# Altium footprint library VL53L9CX.PcbLib: 1 footprints
Each footprint in its own frame and in the unit in brackets; x right, y up, seen from the top. Pads: shape width x height; smd on the part's side, far side on the other; paste and mask are expansions set on the pad; w line width, h text height; cw(c..) or ccw(c..) is an arc to the next point about the centre after c.
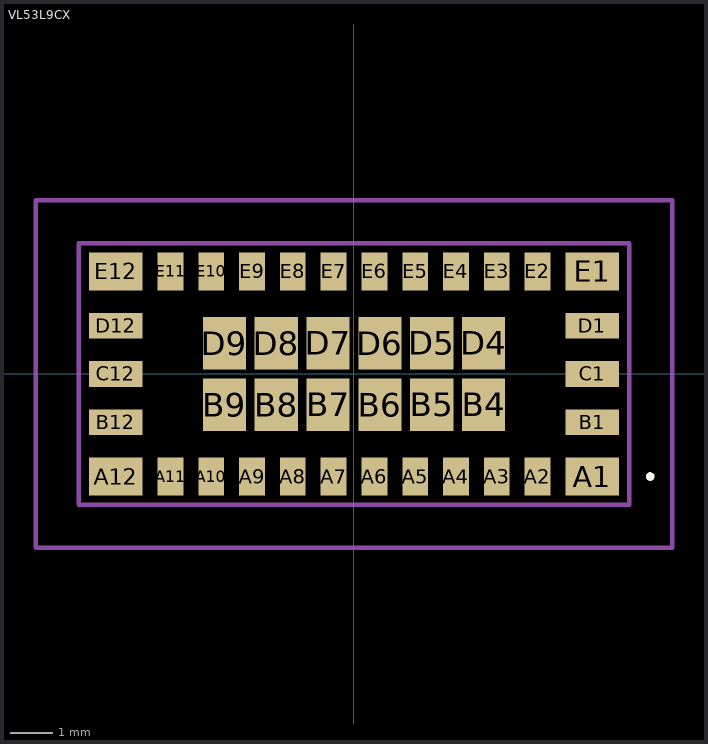
[diagram p0: the footprint, top view; thin cyan lines are the x and y axes]

## VL53L9CX [mm]
pads (42):
  rect 1.255x0.88 smd: A1(5.553,-2.39) A12(-5.553,-2.39) E1(5.553,2.39) E12(-5.553,2.39)
  rect 0.6x0.88 smd: A2(4.275,-2.39) A3(3.325,-2.39) A4(2.375,-2.39) A5(1.425,-2.39) A6(0.475,-2.39) A7(-0.475,-2.39) A8(-1.425,-2.39) A9(-2.375,-2.39) A10(-3.325,-2.39) A11(-4.275,-2.39) E2(4.275,2.39) E3(3.325,2.39) E4(2.375,2.39) E5(1.425,2.39) E6(0.475,2.39) E7(-0.475,2.39) E8(-1.425,2.39) E9(-2.375,2.39) E10(-3.325,2.39) E11(-4.275,2.39)
  rect 1.255x0.6 smd: B1(5.553,-1.125) B12(-5.553,-1.125) C1(5.553,0) C12(-5.553,0) D1(5.553,1.125) D12(-5.553,1.125)
  rect 1.008x1.225 smd: B4(3.02,-0.713) B5(1.812,-0.713) B6(0.604,-0.713) B7(-0.604,-0.713) B8(-1.812,-0.713) B9(-3.02,-0.713) D4(3.02,0.713) D5(1.812,0.713) D6(0.604,0.713) D7(-0.604,0.713) D8(-1.812,0.713) D9(-3.02,0.713)
Top Overlay:
  lines w0.1: 6.852,-2.39 cw(c6.903,-2.39) 6.954,-2.39 ; 6.953,-2.39 cw(c6.903,-2.39) 6.853,-2.39 ; 6.853,-2.39 6.853,-2.39 ; 6.953,-2.39 6.953,-2.39
Mechanical 15:
  lines w0.1: -6.415,-3.05 6.415,-3.05 6.415,3.05 -6.415,3.05 -6.415,-3.05
Mechanical 20:
  lines w0.1: -7.415,-4.05 7.415,-4.05 7.415,4.05 -7.415,4.05 -7.415,-4.05